# Altium schematic symbol library R_30K.SchLib: 1 symbol
Pins are listed as number, name and electrical type; pins without a type are passive.

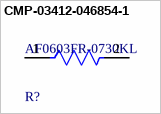
[diagram p0: symbol CMP-03412-046854-1]

## CMP-03412-046854-1
designator R?, comment AF0603FR-0730KL
Anti-Sulfurated Chip Resistors Automotive Grade 30kΩ 1% 100ppm/°C 0603; Resistance: 30kR; Max Power Dissipation: 100mW; Max Operating Temperature: 155°C; Resistor Type: Thick Film; Length: 0.063inch; Packaging: Tape and Reel; Case/Package: 0603; Features: Moisture Resistant; Tolerance: 1%; Temperature Coefficient: 100ppm/°C; RoHS Compliant: Yes; Series: AF; Height: 0.022inch; Number of Terminations: 2; Width: 0.031inch; Min Operating Temperature: -55°C
footprint FP-AF0603-IPC_A
footprint FP-AF0603-IPC_B
footprint FP-AF0603-IPC_C
footprint FP-AF0603-MFG
pins: 1, 2